# Altium footprint library Verdin Development Board.PcbLib: 154 footprints (part 5 of 10)
Each footprint in its own frame and in the unit in brackets; x right, y up, seen from the top. Pads: shape width x height; smd on the part's side, far side on the other; paste and mask are expansions set on the pad; w line width, h text height; cw(c..) or ccw(c..) is an arc to the next point about the centre after c.
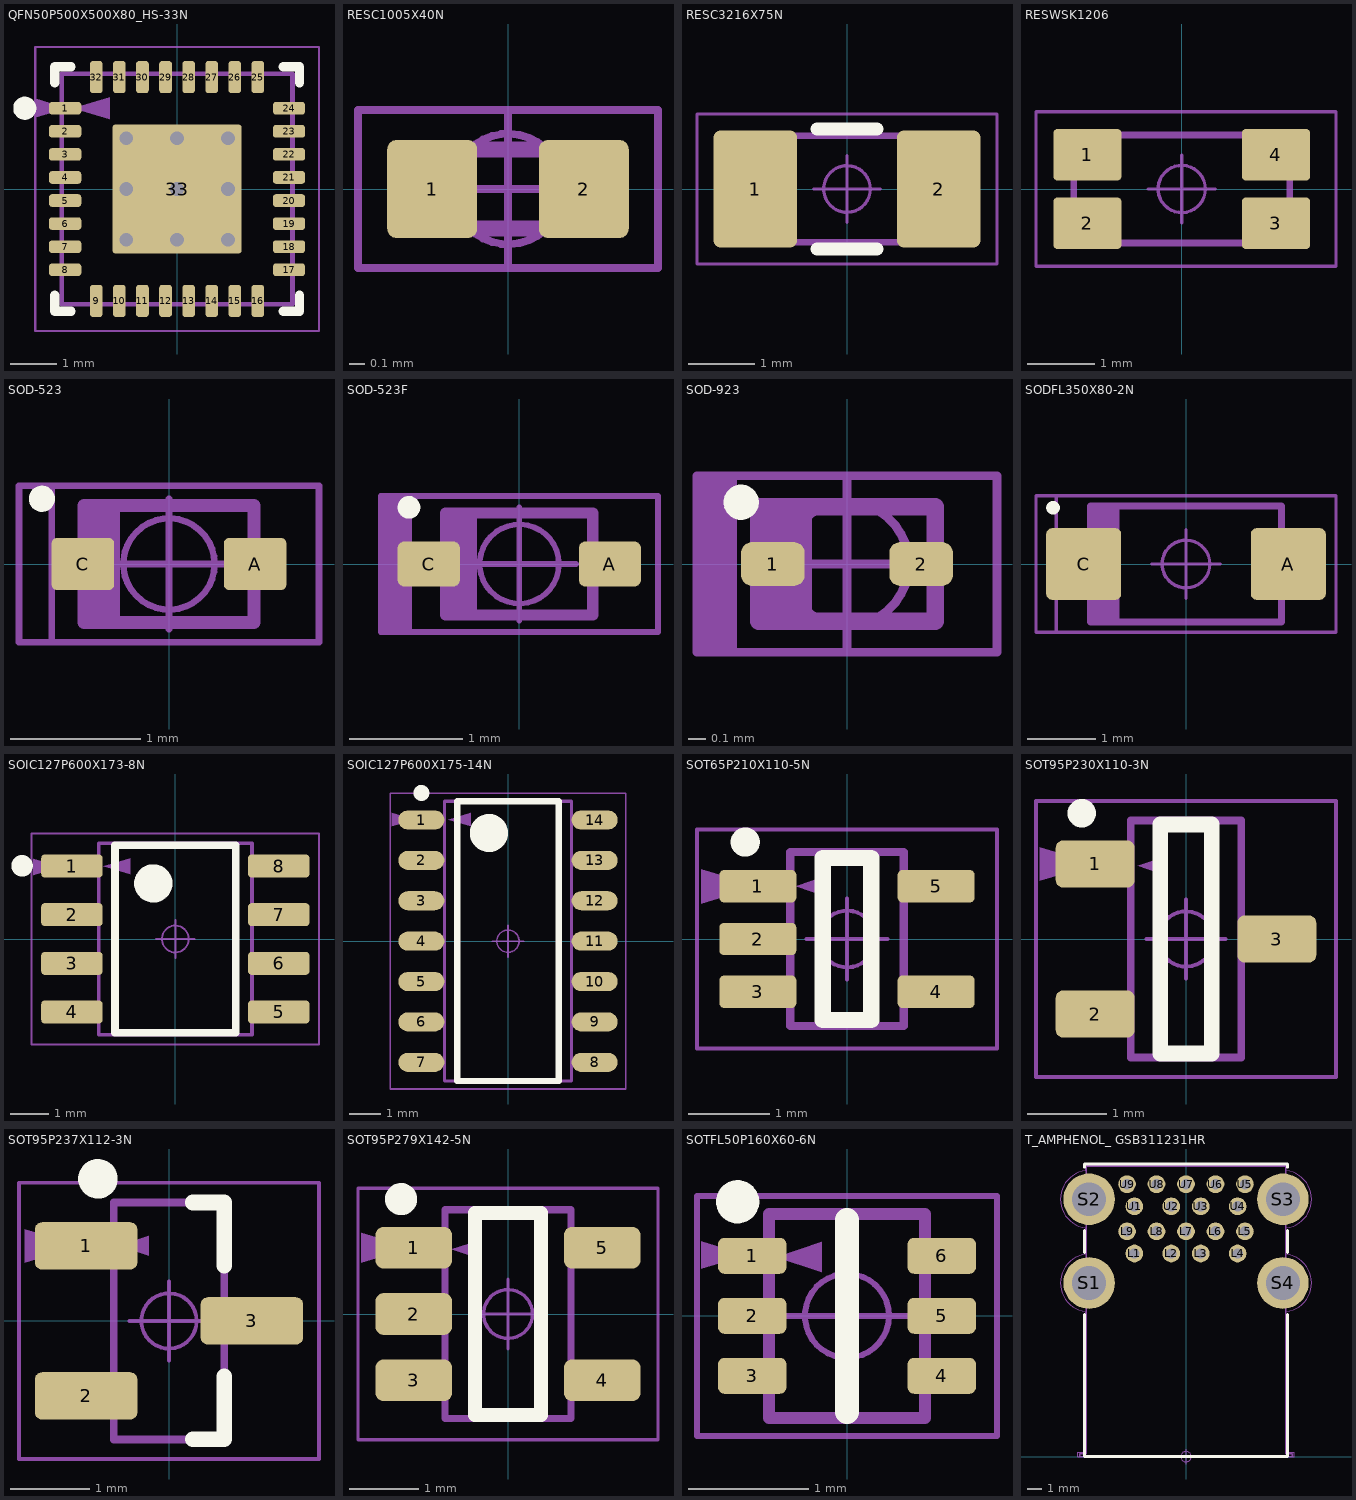
[diagram p4: the footprints below, top view; thin cyan lines are the x and y axes]

## QFN50P500X500X80_HS-33N [mm] "QFN, 32-Leads, Body 5.00x5.00mm, Pitch 0.50mm, Thermal Pad 3.50x3.50mm, IPC Medium Density"
height 0.8
pads (33):
  rrect50% 0.7x0.275 smd: 1(-2.425,1.75)
  rrect50% 0.7x0.275 smd mask+0.095: 2(-2.425,1.25) 3(-2.425,0.75) 4(-2.425,0.25) 5(-2.425,-0.25) 6(-2.425,-0.75) 7(-2.425,-1.25) 8(-2.425,-1.75) 17(2.425,-1.75) 18(2.425,-1.25) 19(2.425,-0.75) 20(2.425,-0.25) 21(2.425,0.25) 22(2.425,0.75) 23(2.425,1.25) 24(2.425,1.75)
  rrect50% 0.275x0.7 smd mask+0.095: 9(-1.75,-2.425) 10(-1.25,-2.425) 11(-0.75,-2.425) 12(-0.25,-2.425) 13(0.25,-2.425) 14(0.75,-2.425) 15(1.25,-2.425) 16(1.75,-2.425) 25(1.75,2.425) 26(1.25,2.425) 27(0.75,2.425) 28(0.25,2.425) 29(-0.25,2.425) 30(-0.75,2.425) 31(-1.25,2.425) 32(-1.75,2.425)
  rrect5% 2.8x2.8 smd paste-10: 33(0,0)
via 1.1,-1.1 diameter 0.6 hole 0.3
via 0,-1.1 diameter 0.6 hole 0.3
via -1.1,-1.1 diameter 0.6 hole 0.3
via 1.1,0 diameter 0.6 hole 0.3
via 0,0 diameter 0.6 hole 0.3
via -1.1,0 diameter 0.6 hole 0.3
via 1.1,1.1 diameter 0.6 hole 0.3
via 0,1.1 diameter 0.6 hole 0.3
via -1.1,1.1 diameter 0.6 hole 0.3
Top Overlay:
  circle w0.25: c-3.3,1.75 r0.125
  lines w0.2: -2.65,-2.3 -2.65,-2.65 -2.3,-2.65 ; -2.65,2.3 -2.65,2.65 -2.3,2.65 ; 2.3,-2.65 2.65,-2.65 2.65,-2.3 ; 2.3,2.65 2.65,2.65 2.65,2.3
Top Paste:
  region: -0.8,-0.075
  region: -0.817,-0.1 -0.836,-0.142 -0.891,-0.216 -0.966,-0.269 -1.054,-0.296 -1.1,-0.3 -1.1,-0.8 -1.041,-0.806 -0.933,-0.851 -0.851,-0.933 -0.806,-1.041 -0.8,-1.1 -0.3,-1.1 -0.296,-1.054 -0.269,-0.966 -0.216,-0.891 -0.142,-0.836 -0.1,-0.817 -0.1,-0.283 -0.131,-0.27 -0.187,-0.234 -0.234,-0.187 -0.27,-0.131 -0.283,-0.1
  region: -1.1,-0.3 -1.325,-0.3 -1.325,-0.8 -1.1,-0.8
  region: -0.8,-1.1 -0.8,-1.325 -0.3,-1.325 -0.3,-1.1
  region: 0.075,-0.8
  region: 0.1,-0.817 0.142,-0.836 0.216,-0.891 0.269,-0.966 0.296,-1.054 0.3,-1.1 0.8,-1.1 0.806,-1.041 0.851,-0.933 0.933,-0.851 1.041,-0.806 1.1,-0.8 1.1,-0.3 1.054,-0.296 0.966,-0.269 0.891,-0.216 0.836,-0.142 0.817,-0.1 0.283,-0.1 0.27,-0.131 0.234,-0.187 0.187,-0.234 0.131,-0.27 0.1,-0.283
  region: 0.3,-1.1 0.3,-1.325 0.8,-1.325 0.8,-1.1
  region: 1.1,-0.8 1.325,-0.8 1.325,-0.3 1.1,-0.3
  region: 0.8,0.075
  region: 0.817,0.1 0.836,0.142 0.891,0.216 0.966,0.269 1.054,0.296 1.1,0.3 1.1,0.8 1.041,0.806 0.933,0.851 0.851,0.933 0.806,1.041 0.8,1.1 0.3,1.1 0.296,1.054 0.269,0.966 0.216,0.891 0.142,0.836 0.1,0.817 0.1,0.283 0.131,0.27 0.187,0.234 0.234,0.187 0.27,0.131 0.283,0.1
  region: 1.1,0.3 1.325,0.3 1.325,0.8 1.1,0.8
  region: 0.8,1.1 0.8,1.325 0.3,1.325 0.3,1.1
  region: -0.075,0.8
  region: -0.1,0.817 -0.142,0.836 -0.216,0.891 -0.269,0.966 -0.296,1.054 -0.3,1.1 -0.8,1.1 -0.806,1.041 -0.851,0.933 -0.933,0.851 -1.041,0.806 -1.1,0.8 -1.1,0.3 -1.054,0.296 -0.966,0.269 -0.891,0.216 -0.836,0.142 -0.817,0.1 -0.283,0.1 -0.27,0.131 -0.234,0.187 -0.187,0.234 -0.131,0.27 -0.1,0.283
  region: -1.1,0.8 -1.325,0.8 -1.325,0.3 -1.1,0.3
  region: -0.3,1.1 -0.3,1.325 -0.8,1.325 -0.8,1.1
Top Component Outline:
  region: -3.087,1.962 -2.388,1.753 -3.087,1.543
  lines w0.05: -3.075,-3.075 3.075,-3.075 3.075,3.075 -3.075,3.075 -3.075,-3.075
Top 3D Body:
  lines w0.01: -2.5,-2.5 -2.5,2.5 2.5,2.5 2.5,-2.5 -2.5,-2.5
Top Dimensions:
  region: -1.464,1.513 -2.264,1.753 -1.464,1.993
  lines w0.1: -2.5,-2.5 2.5,-2.5 2.5,2.5 -2.5,2.5 -2.5,-2.5
Top Component Center:
  circle w0.05: c0,0 r0.35
  lines w0.05: -0.5,0 0.5,0 ; 0,-0.5 0,0.5
Top Assembly:
  text ".Designator" at -1.689,-0.17 h0.75
3D body "TestQFN32.step": height 0.8, standoff 0, extent -2.501,-2.501 2.501,2.501

## RESC1005X40N [mm]
pads (2):
  rrect20% 0.57x0.62 smd: 1(-0.48,0) 2(0.48,0)
Top Component Outline:
  lines w0.05: -0.95,-0.5 0.95,-0.5 0.95,0.5 -0.95,0.5 -0.95,-0.5
Top 3D Body:
  lines w0.001: -0.5,-0.25 0.5,-0.25 0.5,0.25 -0.5,0.25 -0.5,-0.25
Top Dimensions:
  lines w0.1: -0.5,-0.25 0.5,-0.25 0.5,0.25 -0.5,0.25 -0.5,-0.25
Top Component Center:
  circle w0.05: c0,0 r0.35
  lines w0.05: -0.5,0 0.5,0 ; 0,-0.5 0,0.5
Top Assembly:
  text ".Designator" at -1.45,0.8 h0.75
3D body "User Library-R_0402.step": height 0.35, standoff 0, extent -0.5,-0.25 0.5,0.25

## RESC3216X75N [mm]
pads (2):
  rrect15% 1.25x1.75 smd: 1(-1.375,0) 2(1.375,0)
Top Overlay:
  lines w0.2: -0.45,-0.9 0.45,-0.9 ; -0.45,0.9 0.45,0.9
Top Component Outline:
  lines w0.05: -2.25,-1.125 -2.25,1.125 2.25,1.125 2.25,-1.125 -2.25,-1.125
Top 3D Body:
  lines w0.001: -1.6,-0.8 -1.6,0.8 1.6,0.8 1.6,-0.8 -1.6,-0.8
Top Dimensions:
  lines w0.1: -1.6,-0.8 -1.6,0.8 1.6,0.8 1.6,-0.8 -1.6,-0.8
Top Component Center:
  circle w0.05: c0,0 r0.35
  lines w0.05: -0.5,0 0.5,0 ; 0,-0.5 0,0.5
Top Assembly:
  text ".Designator" at -1.55,1.475 h0.75
3D body "User Library-R_1206.STEP": height 0.6, standoff 0, extent -1.6,-0.8 1.6,0.8

## RESWSK1206 [mil]
pads (4):
  rrect15% 39.76x30 smd: 1(-55,20) 2(-55,-20) 3(55,-20) 4(55,20)
Top Component Outline:
  lines w1.97: -85,-45 -85,45 90,45 90,-45 -85,-45
Top 3D Body:
  lines w0.04: -62.98,-31.49 -62.98,31.51 63,31.51 63,-31.49 -62.98,-31.49
Top Dimensions:
  lines w3.94: -62.99,-31.5 -62.99,31.5 62.99,31.5 62.99,-31.5 -62.99,-31.5
Top Component Center:
  circle w1.97: c0,0 r13.78
  lines w1.97: -19.68,0 19.68,0 ; 0,-19.68 0,19.68
Top Assembly:
  text ".Designator" at -59.06,56.1 h29.53
3D body "WSK1206.stp": height 25, standoff 0, extent -62.98,-31.49 63,31.51

## SOD-523 [mm]
pads (2):
  rrect20% 0.48x0.4 smd: A(0.66,0) C(-0.66,0)
Top Overlay:
  circle w0.1: c-0.975,0.5 r0.05
Top Component Outline:
  lines w0.05: -0.9,-0.6 -0.9,0.6 ; -1.15,-0.6 -1.15,0.6 1.15,0.6 1.15,-0.6 -1.15,-0.6
Top 3D Body:
  lines w0.001: -0.65,-0.45 0.65,-0.45 0.65,0.45 -0.65,0.45 -0.65,-0.45
Top Dimensions:
  rectangle: -0.65,-0.45 -0.375,0.45
  region: -0.65,0.45
  lines w0.1: -0.65,-0.45 -0.65,0.45 0.65,0.45 0.65,-0.45 -0.65,-0.45
Top Component Center:
  circle w0.05: c0,0 r0.35
  lines w0.05: -0.5,0 0.5,0 ; 0,-0.5 0,0.5
Top Assembly:
  text ".Designator" at -0.975,0.825 h0.75
3D body "SODFL160X70-2N.step": height 0.7, standoff 0, extent -0.8,-0.45 0.8,0.45

## SOD-523F [mm]
pads (2):
  rrect30% 0.55x0.4 smd: A(0.8,0) C(-0.8,0)
Top Overlay:
  circle w0.1: c-0.975,0.5 r0.05
Top Component Outline:
  region: -1.425,0.25
  region: -1.225,0.6 -1.225,-0.6 -0.975,-0.6 -0.975,0.6
  lines w0.05: -0.975,-0.6 -0.975,0.6 ; -1.225,-0.6 1.225,-0.6 1.225,0.6 -1.225,0.6 -1.225,-0.6
Top 3D Body:
  lines w0.001: -0.65,-0.45 -0.65,0.45 0.65,0.45 0.65,-0.45 -0.65,-0.45
Top Dimensions:
  rectangle: -0.65,-0.45 -0.375,0.45
  lines w0.1: -0.65,-0.45 0.65,-0.45 0.65,0.45 -0.65,0.45 -0.65,-0.45
Top Component Center:
  circle w0.05: c0,0 r0.35
  lines w0.05: -0.5,0 0.5,0 ; 0,-0.5 0,0.5
Top Assembly:
  text ".Designator" at -0.975,0.825 h0.75
3D body "SODFL160X70-2N.step": height 0.7, standoff 0, extent -0.8,-0.45 0.8,0.45

## SOD-923 [mm] "SOD-923, 2-Leads, Body 0.60x1.00mm, IPC Medium Density"
height 0.4
pads (2):
  rrect50% 0.36x0.25 smd mask+0.05: 1(-0.42,0) 2(0.42,0)
Top Overlay:
  circle w0.1: c-0.6,0.35 r0.05
Top Component Outline:
  region: -0.85,0.5 -0.625,0.5 -0.625,-0.5 -0.85,-0.5
  lines w0.05: -0.85,-0.5 -0.85,0.5 0.85,0.5 0.85,-0.5 -0.85,-0.5
Top 3D Body:
  lines w0.001: -0.5,-0.325 0.5,-0.325 0.5,0.325 -0.5,0.325 -0.5,-0.325
Top Dimensions:
  region: -0.5,0.325 -0.2,0.325 -0.2,-0.325 -0.5,-0.325
  lines w0.1: -0.5,-0.325 0.5,-0.325 0.5,0.325 -0.5,0.325 -0.5,-0.325
Top Component Center:
  circle w0.05: c0,0 r0.35
  lines w0.05: -0.5,0 0.5,0 ; 0,-0.5 0,0.5
Top Assembly:
  text ".Designator" at -0.3,-0.2 h0.6
3D body "User Library-DIODE_SOD-923.STEP": height 0.43, standoff 0, extent -0.525,-0.325 0.525,0.325

## SODFL350X80-2N [mm]
pads (2):
  rrect15% 1.1x1.05 smd: A(1.5,0) C(-1.5,0)
Top Overlay:
  circle w0.1: c-1.95,0.825 r0.05
Top Component Outline:
  lines w0.05: -1.9,-1 -1.9,1 ; -2.2,-1 2.2,-1 2.2,1 -2.2,1 -2.2,-1
Top 3D Body:
  lines w0.001: -1.4,-0.85 1.4,-0.85 1.4,0.85 -1.4,0.85 -1.4,-0.85
Top Dimensions:
  rectangle: -1.4,-0.85 -0.975,0.85
  region: -1.4,0.85
  lines w0.1: -1.4,-0.85 -1.4,0.85 1.4,0.85 1.4,-0.85 -1.4,-0.85
Top Component Center:
  circle w0.05: c0,0 r0.35
  lines w0.05: -0.5,0 0.5,0 ; 0,-0.5 0,0.5
Top Assembly:
  text ".Designator" at -1.55,1.325 h0.75
3D body "SODFL350X80-2N.step": height 0.8, standoff 0, extent -1.75,-0.85 1.75,0.85

## SOIC127P600X173-8N [mm]
pads (8):
  rrect30% 1.6x0.6 smd: 1(-2.7,1.905) 2(-2.7,0.635) 3(-2.7,-0.635) 4(-2.7,-1.905) 5(2.7,-1.905) 6(2.7,-0.635) 7(2.7,0.635) 8(2.7,1.905)
Top Overlay:
  circle w0.5: c-0.575,1.45 r0.25
  circle w0.4: c-4,1.91 r0.08
  lines w0.2: -1.575,-2.45 1.575,-2.45 1.575,2.45 -1.575,2.45 -1.575,-2.45
Top Component Outline:
  region: -3.705,1.669 -2.995,1.881 -3.705,2.095
  lines w0.05: -3.75,-2.75 3.75,-2.75 3.75,2.75 -3.75,2.75 -3.75,-2.75
Top 3D Body:
  lines w0.001: -2,-2.5 2,-2.5 2,2.5 -2,2.5 -2,-2.5
Top Dimensions:
  region: -1.175,2.113 -1.885,1.9 -1.175,1.687
  lines w0.1: -2,-2.5 2,-2.5 2,2.5 -2,2.5 -2,-2.5
Top Component Center:
  circle w0.05: c0,0 r0.35
  lines w0.05: -0.5,0 0.5,0 ; 0,-0.5 0,0.5
Top Assembly:
  text ".Designator" at -1.475,3 h0.75
3D body "User Library-SOIC127P500X620X175-8.STEP": height 1.75, standoff 0, extent -3.115,-2.5 3.115,2.5

## SOIC127P600X175-14N [mm] "SOIC, 14-Leads, Body 8.65x3.90mm, Pitch 1.27mm, IPC Medium Density"
height 1.75
pads (14):
  oval 1.45x0.6 smd: 1(-2.725,3.81) 2(-2.725,2.54) 3(-2.725,1.27) 4(-2.725,0) 5(-2.725,-1.27) 6(-2.725,-2.54) 7(-2.725,-3.81) 8(2.725,-3.81) 9(2.725,-2.54) 10(2.725,-1.27) 11(2.725,0) 12(2.725,1.27) 13(2.725,2.54) 14(2.725,3.81)
Top Overlay:
  circle w0.6: c-0.6,3.4 r0.3
  circle w0.25: c-2.725,4.66 r0.125
  lines w0.2: -1.6,-4.4 1.6,-4.4 1.6,4.4 -1.6,4.4 -1.6,-4.4
Top Component Outline:
  region: -3.65,3.612 -2.94,3.825 -3.65,4.038
  lines w0.05: -3.7,-4.65 -3.7,4.65 ; -3.7,-4.65 3.7,-4.65 ; -3.7,-4.65 3.7,-4.65 ; -3.7,-4.65 -3.7,4.65 ; -3.7,4.65 3.7,4.65 ; -3.7,4.65 3.7,4.65 ; 3.7,-4.65 3.7,4.65 ; 3.7,-4.65 3.7,4.65
Top 3D Body:
  lines w0.001: -2,-4.4 -2,4.4 2,4.4 2,-4.4 -2,-4.4
Top Dimensions:
  region: -1.165,4.038 -1.875,3.825 -1.165,3.612
  lines w0.1: -2,-4.4 2,-4.4 2,4.4 -2,4.4 -2,-4.4
Top Component Center:
  circle w0.05: c0,0 r0.35
  lines w0.05: -0.5,0 0.5,0 ; 0,-0.5 0,0.5
Top Assembly:
  text ".Designator" at -1.75,4.9 h0.75
3D body "SOIC127P600X175-14N.step": height 1.75, standoff 0, extent -3,-4.4 3,4.4

## SOT65P210X110-5N [mm]
pads (5):
  rrect30% 0.95x0.4 smd: 1(-1.1,0.65) 2(-1.1,0) 3(-1.1,-0.65) 4(1.1,-0.65) 5(1.1,0.65)
Top Overlay:
  circle w0.2: c-1.255,1.195 r0.08
  lines w0.2: -0.3,-1 0.3,-1 0.3,1 -0.3,1 -0.3,-1
Top Component Outline:
  region: -1.8,0.437 -1.09,0.65 -1.8,0.863
  lines w0.05: -1.85,-1.35 1.85,-1.35 1.85,1.35 -1.85,1.35 -1.85,-1.35
Top 3D Body:
  lines w0.001: -0.7,-1.075 0.7,-1.075 0.7,1.075 -0.7,1.075 -0.7,-1.075
Top Dimensions:
  region: -0.635,0.65 -0.254,0.777 -0.254,0.523
  lines w0.1: -0.7,-1.075 0.7,-1.075 0.7,1.075 -0.7,1.075 -0.7,-1.075
Top Component Center:
  circle w0.05: c0,0 r0.35
  lines w0.05: -0.5,0 0.5,0 ; 0,-0.5 0,0.5
Top Assembly:
  text ".Designator" at -1.5,1.625 h0.75
3D body "test-13.step": height 1.1, standoff 0, extent -1.2,-1.075 1.2,1.075

## SOT95P230X110-3N [mm]
pads (3):
  rrect30% 1x0.6 smd: 1(-1.15,0.95) 2(-1.15,-0.95) 3(1.15,0)
Top Overlay:
  circle w0.2: c-1.321,1.593 r0.08
  lines w0.2: -0.325,-1.45 -0.325,1.45 0.325,1.45 0.325,-1.45 -0.325,-1.45
Top Component Outline:
  region: -1.85,0.737 -1.14,0.95 -1.85,1.163
  lines w0.05: -1.9,-1.75 -1.9,1.75 1.9,1.75 1.9,-1.75 -1.9,-1.75
Top 3D Body:
  lines w0.001: -0.7,-1.5 -0.7,1.5 0.7,1.5 0.7,-1.5 -0.7,-1.5
Top Dimensions:
  region: -0.61,0.925 -0.229,1.052 -0.229,0.798
  lines w0.1: -0.7,-1.5 -0.7,1.5 0.7,1.5 0.7,-1.5 -0.7,-1.5
Top Component Center:
  circle w0.05: c0,0 r0.35
  lines w0.05: -0.5,0 0.5,0 ; 0,-0.5 0,0.5
Top Assembly:
  text ".Designator" at -1.8,2 h0.75
3D body "User Library-SOT-23-2.STEP": height 1.08, standoff 0, extent -1.32,-1.5 1.32,1.5

## SOT95P237X112-3N [mm]
pads (3):
  rrect30% 1.3x0.6 smd: 1(-1.05,0.95) 2(-1.05,-0.95) 3(1.05,0)
Top Overlay:
  circle w0.25: c-0.9,1.8 r0.125
  lines w0.2: 0.3,-1.5 0.7,-1.5 0.7,-0.7 ; 0.3,1.5 0.7,1.5 0.7,0.7
Top Component Outline:
  region: -1.825,0.737 -1.115,0.95 -1.825,1.163
  lines w0.05: -1.9,-1.75 -1.9,1.75 1.9,1.75 1.9,-1.75 -1.9,-1.75
Top 3D Body:
  lines w0.001: -0.7,-1.5 0.7,-1.5 0.7,1.5 -0.7,1.5 -0.7,-1.5
Top Dimensions:
  region: -0.635,0.95 -0.254,1.077 -0.254,0.823
  lines w0.1: -0.7,-1.5 -0.7,1.5 0.7,1.5 0.7,-1.5 -0.7,-1.5
Top Component Center:
  circle w0.05: c0,0 r0.35
  lines w0.05: -0.5,0 0.5,0 ; 0,-0.5 0,0.5
Top Assembly:
  text ".Designator" at -1.6,2.1 h0.75
3D body "CircuitWorks-SOT-23.step": height 1.09, standoff 0, extent -1.25,-1.5 1.25,1.5

## SOT95P279X142-5N [mm]
pads (5):
  rrect40% 1.1x0.6 smd: 1(-1.35,0.95) 2(-1.35,0) 3(-1.35,-0.95) 4(1.35,-0.95) 5(1.35,0.95)
Top Overlay:
  circle w0.3: c-1.533,1.646 r0.08
  lines w0.2: -0.475,-1.45 -0.475,1.45 0.475,1.45 0.475,-1.45 -0.475,-1.45
Top Component Outline:
  region: -2.1,0.737 -1.39,0.95 -2.1,1.163
  lines w0.05: -2.15,-1.8 -2.15,1.8 2.15,1.8 2.15,-1.8 -2.15,-1.8
Top 3D Body:
  lines w0.001: -0.9,-1.45 -0.9,1.45 0.9,1.45 0.9,-1.45 -0.9,-1.45
Top Dimensions:
  region: -0.81,0.925 -0.429,1.052 -0.429,0.798
  lines w0.1: -0.9,-1.5 -0.9,1.5 0.9,1.5 0.9,-1.5 -0.9,-1.5
Top Component Center:
  circle w0.05: c0,0 r0.35
  lines w0.05: -0.5,0 0.5,0 ; 0,-0.5 0,0.5
Top Assembly:
  text ".Designator" at -1.7,2.25 h0.75
3D body "User Library-SOT23-5-2.step": height 1.45, standoff 0, extent -1.4,-1.45 1.4,1.45

## SOTFL50P160X60-6N [mm]
pads (6):
  rrect35% 0.57x0.3 smd: 1(-0.79,0.5) 2(-0.79,0) 3(-0.79,-0.5) 4(0.79,-0.5) 5(0.79,0) 6(0.79,0.5)
Top Overlay:
  circle w0.2: c-0.911,0.95 r0.08
  lines w0.2: 0,-0.8 0,0.8
Top Component Outline:
  region: -1.214,0.393 -0.836,0.507 -1.214,0.62
  lines w0.05: -1.25,-1 1.25,-1 1.25,1 -1.25,1 -1.25,-1
Top 3D Body:
  lines w0.001: -0.65,-0.85 0.65,-0.85 0.65,0.85 -0.65,0.85 -0.65,-0.85
Top Dimensions:
  region: -0.59,0.489 -0.209,0.616 -0.209,0.362
  lines w0.1: -0.65,-0.85 0.65,-0.85 0.65,0.85 -0.65,0.85 -0.65,-0.85
Top Component Center:
  circle w0.05: c0,0 r0.35
  lines w0.05: -0.5,0 0.5,0 ; 0,-0.5 0,0.5
Top Assembly:
  text ".Designator" at -1.4,1.35 h0.75
3D body "User Library-SOT-563.STEP": height 0.58, standoff 0, extent -0.813,-0.8 0.813,0.8

## T_AMPHENOL_ GSB311231HR [mm]
pads (22):
  round 1.2 hole 0.7: L1(-3.5,13.78) L2(-1,13.78) L3(1,13.78) L4(3.5,13.78) L5(4,15.28) L6(2,15.28) L7(0,15.28) L8(-2,15.28) L9(-4,15.28) U1(-3.5,16.98) U2(-1,16.98) U3(1,16.98) U4(3.5,16.98) U5(4,18.48) U6(2,18.48) U7(0,18.48) U8(-2,18.48) U9(-4,18.48)
  round 3.5 hole 2.3: S1(-6.57,11.78) S2(-6.57,17.46) S3(6.57,17.46) S4(6.57,11.78)
Top Overlay:
  lines w0.2: -6.9,9.65 -6.9,0 6.9,0 6.9,9.65 ; -6.9,13.85 -6.9,15.35 ; -6.9,19.63 -6.9,19.85 6.9,19.85 6.9,19.63 ; 6.9,13.85 6.9,15.35
Top Component Outline:
  lines w0.05: -6.809,9.837 -6.809,0.3 -7.349,0.3 -7.349,0 7.349,0 7.349,0.3 6.81,0.3 6.809,9.838 ; -6.809,13.725 -6.809,15.515 ; -6.809,9.837 cw(c-6.565,11.779) -6.809,13.722 ; -6.809,15.517 cw(c-6.565,17.459) -6.809,19.402 -6.809,19.76 6.809,19.76 6.809,19.403 ; 6.809,9.838 ccw(c6.565,11.781) 6.809,13.723 ; 6.809,15.518 ccw(c6.565,17.461) 6.809,19.403 ; 6.809,13.725 6.809,15.515
Top 3D Body:
  lines w0.01: -6.753,19.7 6.747,19.7 ; -6.75,19.7 -6.75,0.2 -7.2,0.2 -7.2,0 7.2,0 7.2,0.2 ; 6.75,19.7 6.75,0.2 7.2,0.2
Top Dimensions:
  lines w0.1: -7.2,0 7.2,0 7.2,0.2 6.75,0.2 6.75,19.7 -6.75,19.7 -6.75,0.2 -7.2,0.2 -7.2,0
Top Component Center:
  circle w0.05: c0,0 r0.35
  lines w0.05: -0.5,0 0.5,0 ; 0,-0.5 0,0.5
Top Assembly:
  text ".Designator" at -1.725,20.175 h0.75
3D body "GSB311231HR.STEP": height 16.13, standoff -3.49, extent -7.795,0 7.795,19.7